# Altium integrated library Leds.IntLib: 10 symbols
Pins are listed as number, name and electrical type; pins without a type are passive.

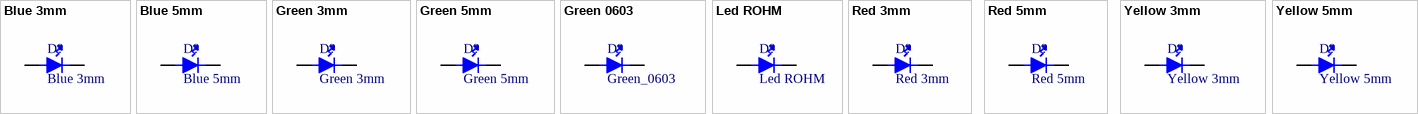
[diagram p0: symbols Blue 3mm to Yellow 5mm]

## Blue 3mm
designator D?
Blue Led 3mm PTH
footprint Blue Led 3mm
pins: A, K

## Blue 5mm
designator D?
Blue Led 5mm PTH
footprint Blue Led 5mm
pins: A, K

## Green 3mm
designator D?
Green Led 3mm PTH
footprint Green Led 3mm
footprint 90Deg Green Led 3mm
pins: A, K

## Green 5mm
designator D?
Green Led 5mm PTH
footprint Green Led 5mm
pins: A, K

## Green 0603
designator D?, comment Green_0603
LED GREEN CLEAR 0603 SMD PN 150060VS75000
footprint Green Led 0603 (PN 150060VS75000)
pins: A, K

## Led ROHM
designator D?
LED PSL0102 COOL WHITE 5000K 2SMD; Supplier 1: Digi-Key; Supplier Part Number 1: 846-1088-1-ND
footprint Led_ROHM_0102 (PN PSL0102WBEA1)
pins: A, K

## Red 3mm
designator D?
Red Led 3mm PTH
footprint Red Led 3MM
footprint 90Deg Red Led 3mm
pins: A, K

## Red 5mm
designator D?
Red Led 5mm PTH
footprint Red Led 5mm
footprint 90Deg Red Led 5mm
footprint Red Led 5mm - LONG
pins: A, K

## Yellow 3mm
designator D?
Yellow Led 3mm PTH
footprint Yellow Led 3mm
pins: A, K

## Yellow 5mm
designator D?
Yellow Led 5mm PTH
footprint Yellow Led 5mm
pins: A, K